# Altium schematic symbol library Schlib2.SchLib: 6 symbols
Pins are listed as number, name and electrical type; pins without a type are passive.

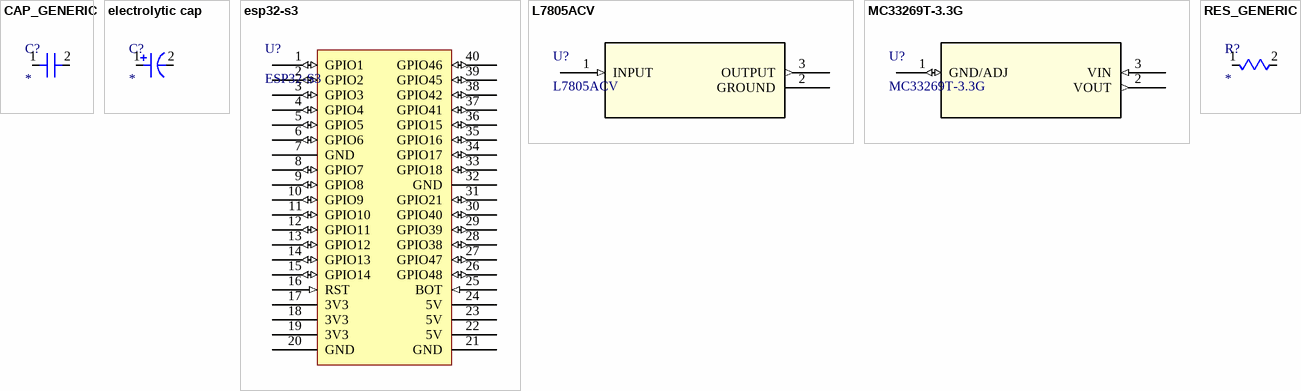
[diagram p0: symbols CAP_GENERIC to RES_GENERIC]

## CAP_GENERIC
designator C?
footprint Generic small capacitor
pins: 1, 2

## electrolytic cap
designator C?
footprint small electrolytic cap
pins: 1, 2

## esp32-s3
designator U?, comment ESP32-S3
footprint esp32
pins: 1 GPIO1 (io), 2 GPIO2 (io), 3 GPIO3 (io), 4 GPIO4 (io), 5 GPIO5 (io), 6 GPIO6 (io), 7 GND (power), 8 GPIO7 (io), 9 GPIO8 (io), 10 GPIO9 (io), 11 GPIO10 (io), 12 GPIO11 (io), 13 GPIO12 (io), 14 GPIO13 (io), 15 GPIO14 (io), 16 RST (in), 17 3V3 (power), 18 3V3 (power), 19 3V3 (power), 20 GND (power), 21 GND (power), 22 5V (power), 23 5V (power), 24 5V (power), 25 BOT (in), 26 GPIO48 (io), 27 GPIO47 (io), 28 GPIO38 (io), 29 GPIO39 (io), 30 GPIO40 (io), 31 GPIO21 (io), 32 GND (power), 33 GPIO18 (io), 34 GPIO17 (io), 35 GPIO16 (io), 36 GPIO15 (io), 37 GPIO41 (io), 38 GPIO42 (io), 39 GPIO45 (io), 40 GPIO46 (io)

## L7805ACV
designator U?
Positive voltage regulator ICs; Manufacturer_Name: STMicroelectronics; Copyright: Copyright (C) 2026 Ultra Librarian. All rights reserved.; Manufacturer_Part_Number: L7805ACV; RefDes: RefDes; Type: Type
footprint TO-220_STM
pins: 1 INPUT (in), 2 GROUND (power), 3 OUTPUT (out)

## MC33269T-3.3G
designator U?
Description; Manufacturer_Name: onsemi; Copyright: Copyright (C) 2025 Ultra Librarian. All rights reserved.; Manufacturer_Part_Number: MC33269T-3.3G; RefDes: RefDes; Type: Type
footprint MC33269T-33
pins: 1 GND/ADJ (io), 2 VOUT (out), 3 VIN (in)

## RES_GENERIC
designator R?
footprint Axial 0.5
pins: 1, 2